# Altium schematic symbol library Misc.SchLib: 15 symbols
Pins are listed as number, name and electrical type; pins without a type are passive.

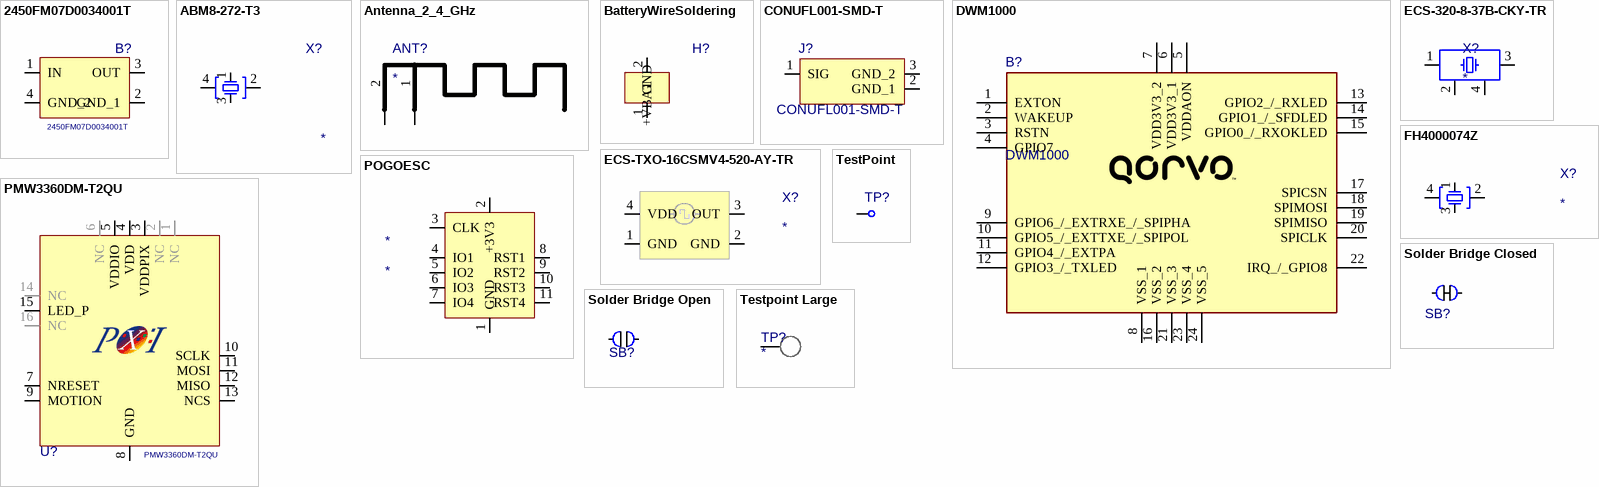
[diagram p0: symbols 2450FM07D0034001T to Testpoint Large]

## 2450FM07D0034001T
designator B?
2.45GHz Impedance Matched Low Pass Filter Optimized for Semtech SX1280 and SX1281 chipsets; Manufacturer_Name: JOHANSON TECHNOLOGY; Geometry.Height: 0.4mm; Mouser Part Number: 609-2450FM07D0034001; Mouser Price/Stock: https://www.mouser.co.uk/ProductDetail/Johanson-Technology/2450FM07D0034001T?qs=jRuttqqUwMRfALoCk7O%252Bzw%3D%3D; Manufacturer_Part_Number: 2450FM07D0034001T; Datasheet Link: https://www.digikey.com/en/products/detail/johanson-technology-inc/2450FM07D0034001T/9477815
footprint 2450FM07D0034001T
pins: 1 IN, 2 GND_1, 3 OUT, 4 GND_2

## ABM8-272-T3
designator X?
Crystals Ultra Miniature Ceramic SMD Crystal / 12MHz 10pF 30PPM 3.2mm x 2.5mm 50R; ComponentLink1Description: Datasheet; ComponentLink1URL: https://www.mouser.de/datasheet/2/122/ECX_1637B-1633271.pdf; ComponentLink2Description: Product Detail; ComponentLink2URL: https://eu.mouser.com/ProductDetail/ECS/ECS-320-8-37B-CKY-TR?qs=l7cgNqFNU1jF5E15eCxZkA%3D%3D
footprint ABM8-272-T3 (Crystals Ultra Miniature Ceramic SMD Crystal / 3.2mm x 2.5mm)
pins: 1, 2, 3, 4

## Antenna_2_4_GHz
designator ANT?
Antenna 2.4GHz for WiFi and Bluetooth, 50 ohms impedance; ESP32 / Pin 1: feed point / Pin 2: GND
footprint Antenna_2_4_GHz (2.4GHz antenna, 15.2x5.7)
pins: 1, 2

## BatteryWireSoldering
designator H?  (value not drawn)
Manual soldering pads (TH), for BT2.0 pigtails using 22awg silicone wiring
footprint BatteryWireSoldering
pins: 1 GND, 2 +VBAT

## CONUFL001-SMD-T
designator J?
RF Connectors / Coaxial Connectors T&R U.FL Straight Surface Mount Jack; Manufacturer_Name: TE Connectivity; Geometry.Height: 1.3mm; Mouser Part Number: N/A; Mouser Price/Stock: https://www.mouser.co.uk/ProductDetail/TE-Connectivity/CONUFL001-SMD-T?qs=3Rah4i%252BhyCHmRzMH%252BkLkPQ%3D%3D; Manufacturer_Part_Number: CONUFL001-SMD-T; Datasheet Link: *
footprint CONUFL001SMDT
pins: 1 SIG, 2 GND_1, 3 GND_2

## DWM1000
designator B?
3.5 - 6.5 GHz Ultra-Wideband (UWB) Transceiver Module; Manufacturer_Name: Qorvo; Geometry.Height: 3.15mm; Manufacturer_Part_Number: DWM1000; Mouser Part Number: 772-DWM1000; Mouser Price/Stock: https://www.mouser.co.uk/ProductDetail/Qorvo/DWM1000?qs=TiOZkKH1s2R6b5D6df63Pg%3D%3D; Arrow Part Number: *; Arrow Price/Stock: *; Datasheet Link: https://www.qorvo.com/products/d/da007948
footprint DWM1000
pins: 1 EXTON, 2 WAKEUP, 3 RSTN, 4 GPIO7, 5 VDDAON, 6 VDD3V3_1, 7 VDD3V3_2, 8 VSS_1, 9 GPIO6_/_EXTRXE_/_SPIPHA, 10 GPIO5_/_EXTTXE_/_SPIPOL, 11 GPIO4_/_EXTPA, 12 GPIO3_/_TXLED, 13 GPIO2_/_RXLED, 14 GPIO1_/_SFDLED, 15 GPIO0_/_RXOKLED, 16 VSS_2, 17 SPICSN, 18 SPIMOSI, 19 SPIMISO, 20 SPICLK, 21 VSS_3, 22 IRQ_/_GPIO8, 23 VSS_4, 24 VSS_5

## ECS-320-8-37B-CKY-TR
designator X?
Crystals 32MHz ESR 50 8pF-30C +85C; ComponentLink1Description: Datasheet; ComponentLink1URL: https://www.mouser.de/datasheet/2/122/ECX_1637B-1633271.pdf; ComponentLink2Description: Product Detail; ComponentLink2URL: https://eu.mouser.com/ProductDetail/ECS/ECS-320-8-37B-CKY-TR?qs=l7cgNqFNU1jF5E15eCxZkA%3D%3D
footprint ECS-320-8-37B-CKY-TR (2.0mm x 1.6mm - Crystals 32MHz ESR 50 8pF-30C +85C)
pins: 1, 2 "Grounded to shield", 3, 4 "Grounded to shield"

## ECS-TXO-16CSMV4-520-AY-TR
designator X?
TCXO Oscillators 52.000 MHz MultiVolt TCXO Clipped Sine Wave 1.7 - 3.6 0.5 ppm -30 - +85C 1.6 x 1.2 mm 4 Pad SM; MPN: ECS-TXO-16CSMV4-520-AY-TR; M: ECS
footprint ECS-TXO-16CSMV4-520-AY-TR (TCXO Oscillators 52.000 MHz MultiVolt TCXO Clipped Sine Wave 1.7 - 3.6 0.5 ppm -30 - +85C 1.6 x 1.2 mm 4 Pad SM)
pins: 1 GND, 2 GND, 3 OUT, 4 VDD

## FH4000074Z
designator X?
Chrystal 40MHz 10ppm 8pF
footprint FH4000074Z (Chrystal 40MHz 10ppm 8pF)
pins: 1, 2, 3, 4

## PMW3360DM-T2QU
designator U?
footprint PMW3360DM-T2QU (Optical Gaming Navigation Chip)
pins: 1 NC, 2 NC, 3 VDDPIX (power), 4 VDD (power), 5 VDDIO (power), 6 NC, 7 NRESET, 8 GND, 9 MOTION, 10 SCLK, 11 MOSI, 12 MISO, 13 NCS, 14 NC, 15 LED_P, 16 NC

## POGOESC
designator *
footprint POGOESC (Footprint for pogo pins programming the ESC AM32 boards)
pins: 1 GND, 2 +3V3, 3 CLK, 4 IO1, 5 IO2, 6 IO3, 7 IO4, 8 RST1, 9 RST2, 10 RST3, 11 RST4

## Solder Bridge Closed
designator SB?  (value not drawn)
solder bridge, normally closed
footprint Solder Bridge Closed (Simple small profile solder bridge, normally closed)
pins: 1, 2

## Solder Bridge Open
designator SB?  (value not drawn)
solder bridge, normally open
footprint Solder Bridge Open (Simple small profile solder bridge, normally open)
pins: 1, 2

## TestPoint
designator TP?  (value not drawn)
High density testpoint, diameter 0.7mm (very small)
footprint TestPoint (High-density test point, diameter 0.7mm (very small))
pins: 1

## Testpoint Large
designator TP?
Testpoint / Test pad for measurements and soldering
footprint Testpoint Large (Testpoint / Test pad for measurements and soldering)
pins: 1